# Altium schematic symbol library Mosfet.SchLib: 175 symbols (part 2 of 4)
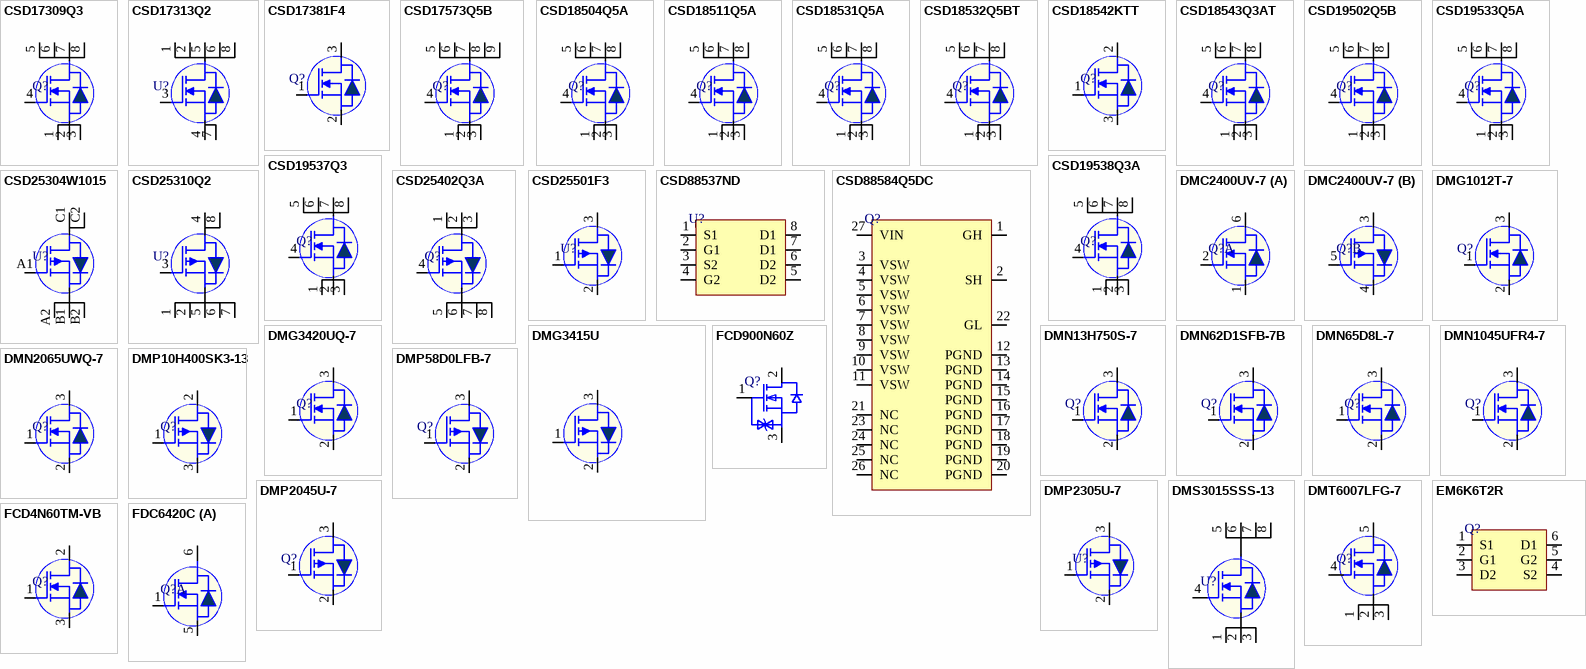
[diagram p5: symbols CSD17309Q3 to FDC6420C]

## CSD19533Q5A
designator Q?
MOSFET N-CH 100V 100A 8VSON; Manufacturer: Texas Instruments; Manufacturer Part Number: CSD19533Q5A; Item Type: MOSFETs; Rds On Max: 9.4mR; Input Capacitance: 2.67nF; Rise Time: 6ns; Max Power Dissipation: 3.2W; Threshold Voltage: 2.8V; Number of Elements: 1; Turn-Off Delay Time: 16ns; Fall Time: 5ns; Gate to Source Voltage (Vgs): 20V; Element Configuration: Single; Drain to Source Resistance: 8.7mR; Polarity: N-CHANNEL; Supplier: Mouser; LCSC Part Number: C110197; RoHS: Yes; Stock: 14779; Pricing: 1=1.43, 10=1.17, 50=1.17, 100=0.907, 1000=0.626, 10000=0.535 (USD); Mounting Technology: Surface Mount; Case/Package: SON; Pins: 8; Contact Plating: Tin; Min Operating Temperature: -55°C; Max Operating Temperature: 150°C; Package Quantity: 2500; Packaging: Tape and Reel; Drain to Source Voltage (Vdss): 100V; Continuous Drain Current (ID): 100A; Power Dissipation: 3.2W; Turn-On Delay Time: 6ns; Number of Channels: 1; Series: NexFET™; Drain to Source Breakdown Voltage: 100V; Lead Free: Contains Lead; Reach SVHC Compliant: No; RoHS Compliant: Yes; ComponentLink1URL: https://datasheet.ciiva.com/29752/csd19533q5a-29752194.pdf?src-supplier=Digikey; ComponentLink1Description: https://datasheet.ciiva.com/29752/csd19533q5a-29752194.pdf?src-supplier=Digikey; ComponentLink2URL: https://datasheet.ciiva.com/46430/1824682-46430379.pdf?src-supplier=Element14; ComponentLink2Description: https://datasheet.ciiva.com/46430/1824682-46430379.pdf?src-supplier=Element14; ComponentLink3URL: https://datasheet.ciiva.com/29752/csd19533q5a-29752206.pdf?src-supplier=Digikey; ComponentLink3Description: https://datasheet.ciiva.com/29752/csd19533q5a-29752206.pdf?src-supplier=Digikey; ComponentLink4URL: https://datasheet.ciiva.com/30021/csd19533q5a-30021948.pdf?src-supplier=Avnet; ComponentLink4Description: https://datasheet.ciiva.com/30021/csd19533q5a-30021948.pdf?src-supplier=Avnet
footprint 8-VSONP (5x6)
pins: 1 S, 2 S, 3 S, 4 G, 5 D, 6 D, 7 D, 8 D

## CSD19537Q3
designator Q?
MOSFET N-CH 100V 9.7A/50A 8VSON; Manufacturer: Texas Instruments; Manufacturer Part Number: CSD19537Q3; Item Type: MOSFETs; Supplier: Mouser; LCSC Part Number: C478469; RoHS: Yes; Stock: 5910; Pricing: 1=1.54, 10=1.02, 50=1.02, 100=0.694, 1000=0.514, 10000=0.439 (USD); ComponentLink1URL: http://www.ti.com/lit/gpn/csd19537q3?src-supplier=Mouser; ComponentLink1Description: http://www.ti.com/lit/gpn/csd19537q3?src-supplier=Mouser; ComponentLink2URL: http://www.ti.com/general/docs/lit/getliterature.tsp?genericPartNumber=CSD19537Q3&&fileType=pdf&src-supplier=Avnet; ComponentLink2Description: http://www.ti.com/general/docs/lit/getliterature.tsp?genericPartNumber=CSD19537Q3&&fileType=pdf&src-supplier=Avnet; ComponentLink3URL: http://www.ti.com/lit/ds/symlink/csd19537q3.pdf?src-supplier=Digikey; ComponentLink3Description: http://www.ti.com/lit/ds/symlink/csd19537q3.pdf?src-supplier=Digikey; ComponentLink4URL: http://www.ti.com/general/docs/suppproductinfo.tsp?distId=10&amp;gotoUrl=http%3A%2F%2Fwww.ti.com%2Flit%2Fgpn%2Fcsd19537q3&src-supplier=Digikey; ComponentLink4Description: http://www.ti.com/general/docs/suppproductinfo.tsp?distId=10&amp;gotoUrl=http%3A%2F%2Fwww.ti.com%2Flit%2Fgpn%2Fcsd19537q3&src-supplier=Digikey
footprint 8-VSON-CLIP (3.3x3.3)
pins: 1 S, 2 S, 3 S, 4 G, 5 D, 6 D, 7 D, 8 D

## CSD19538Q3A
designator Q?
MOSFET N-CH 100V 15A 8VSON; Manufacturer: Texas Instruments; Manufacturer Part Number: CSD19538Q3A; Item Type: IC; Drain to Source Resistance: 49mR; Gate to Source Voltage (Vgs): 20V; Number of Channels: 1NUMBER; Power Dissipation: 2.8W; Turn-Off Delay Time: 7ns; Turn-On Delay Time: 5ns; Supplier: Mouser; LCSC Part Number: C478471; RoHS: Yes; Stock: 14931; Pricing: 1=0.57, 10=0.496, 50=0.496, 100=0.343, 1000=0.244, 10000=0.19 (USD); Drain to Source Breakdown Voltage: 100V; Length: 3.3mm; Width: 3.3mm; Height: 900um; Thickness: 800um; Lead Free: 5697LeadFree; ComponentLink1URL: http://www.ti.com/lit/ds/symlink/csd19538q3a.pdf?src-supplier=Digikey; ComponentLink1Description: http://www.ti.com/lit/ds/symlink/csd19538q3a.pdf?src-supplier=Digikey
footprint VSONP-8(3.1x3.1)
pins: 1 S, 2 S, 3 S, 4 G, 5 D, 6 D, 7 D, 8 D

## CSD25304W1015
designator U?
MOSFET P-CH 20V 3A 6DSBGA; Manufacturer: Texas Instruments; Manufacturer Part Number: CSD25304W1015; Item Type: IC; Supplier: Digi-Key; Supplier Part Number: 296-40005-1-ND; RoHS: Yes; Category: Integrated Circuits (ICs); Stock: 3000; Pricing: 1=0.51, 10=0.436, 100=0.3252, 500=0.25552, 1000=0.19746 (USD); ComponentLink1URL: http://www.ti.com/general/docs/suppproductinfo.tsp?distId=10&amp;gotoUrl=http%3A%2F%2Fwww.ti.com%2Flit%2Fgpn%2Fcsd25304w1015&src-supplier=Digi-Key; ComponentLink1Description: http://www.ti.com/general/docs/suppproductinfo.tsp?distId=10&amp;gotoUrl=http%3A%2F%2Fwww.ti.com%2Flit%2Fgpn%2Fcsd25304w1015&src-supplier=Digi-Key; ComponentLink2URL: http://www.ti.com/lit/ds/symlink/csd25304w1015.pdf?src-supplier=Digi-Key; ComponentLink2Description: http://www.ti.com/lit/ds/symlink/csd25304w1015.pdf?src-supplier=Digi-Key; ComponentLink3URL: http://www.ti.com/general/docs/lit/getliterature.tsp?genericPartNumber=CSD25304W1015&&fileType=pdf&src-supplier=Avnet; ComponentLink3Description: http://www.ti.com/general/docs/lit/getliterature.tsp?genericPartNumber=CSD25304W1015&&fileType=pdf&src-supplier=Avnet; ComponentLink4URL: http://www.ti.com/lit/gpn/csd25304w1015?src-supplier=Mouser; ComponentLink4Description: http://www.ti.com/lit/gpn/csd25304w1015?src-supplier=Mouser; LCSC Part Number: C2860532
footprint 6-DSBGA (1x1.5)
pins: A1 G, A2 S, B1 S, B2 S, C1 D, C2 D

## CSD25310Q2
designator U?
MOSFET P-CH 20V 48A 6SON; Manufacturer: Texas Instruments; Manufacturer Part Number: CSD25310Q2; Supplier: Mouser; Supplier Part Number: 595-CSD25310Q2; RoHS: Yes; Category: Integrated Circuits (ICs); Stock: 10899; Pricing: 1=0.51, 10=0.438, 50=0.438, 100=0.327, 1000=0.198, 10000=0.136 (USD); ComponentLink1URL: https://datasheet.ciiva.com/29747/csd25310q2-29747573.pdf?src-supplier=Digi-Key; ComponentLink1Description: https://datasheet.ciiva.com/29747/csd25310q2-29747573.pdf?src-supplier=Digi-Key; LCSC Part Number: C468254; Item Type: Mosfet
footprint CSD25310Q2
pins: 1 S, 2 S, 3 G, 4 D, 5 S, 6 S, 7 S, 8 D

## CSD25402Q3A
designator Q?
MOSFET P-CH 20V 76A 8VSON; Manufacturer: Texas Instruments; Manufacturer Part Number: CSD25402Q3A; Item Type: MOSFETs; Power Dissipation: 2.8W; Supplier: Mouser; Supplier Part Number: 595-CSD25402Q3A; RoHS: Yes; Stock: 40126; Pricing: 1=0.81, 10=0.722, 50=0.722, 100=0.493, 1000=0.35, 10000=0.312 (USD); Thickness: 800um; ComponentLink1URL: https://datasheet.ciiva.com/30021/csd25402q3a-30021955.pdf?src-supplier=Avnet; ComponentLink1Description: https://datasheet.ciiva.com/30021/csd25402q3a-30021955.pdf?src-supplier=Avnet; LCSC Part Number: C111356
footprint 8-VSONP (3x3.3)
pins: 1 D, 2 D, 3 D, 4 G, 5 S, 6 S, 7 S, 8 S

## CSD25501F3
designator U?
MOSFET P-CH 20V 3.6A 3LGA; Manufacturer: Texas Instruments; Manufacturer Part Number: CSD25501F3; Element Configuration: Single; Rds On Max: 76mR; Input Capacitance: 385pF; Max Power Dissipation: 500mW; Item Type: IC; Supplier: Mouser; Supplier Part Number: 595-CSD25501F3; RoHS: Yes; Category: Integrated Circuits (ICs); Stock: 42227; Pricing: 1=0.45, 10=0.34, 50=0.34, 100=0.212, 1000=0.112, 10000=0.086 (USD); Mounting Technology: Surface Mount; Case/Package: LGA; Pins: 3; Min Operating Temperature: -55°C; Max Operating Temperature: 150°C; Packaging: Cut Tape; Drain to Source Voltage (Vdss): 20V; Continuous Drain Current (ID): 3.6A; Series: FemtoFET™; RoHS Compliant: Yes; ComponentLink1URL: http://www.ti.com/lit/ds/symlink/csd25501f3.pdf?src-supplier=Digi-Key; ComponentLink1Description: http://www.ti.com/lit/ds/symlink/csd25501f3.pdf?src-supplier=Digi-Key; ComponentLink2URL: http://www.ti.com/general/docs/suppproductinfo.tsp?distId=10&amp;gotoUrl=http%3A%2F%2Fwww.ti.com%2Flit%2Fgpn%2Fcsd25501f3&src-supplier=Digi-Key; ComponentLink2Description: http://www.ti.com/general/docs/suppproductinfo.tsp?distId=10&amp;gotoUrl=http%3A%2F%2Fwww.ti.com%2Flit%2Fgpn%2Fcsd25501f3&src-supplier=Digi-Key; LCSC Part Number: C2872196
footprint PicoStar-3
pins: 1 G, 2 S, 3 D

## CSD88537ND
designator U?
MOSFET 2N-CH 60V 15A 8SOIC; Manufacturer: Texas Instruments; Manufacturer Part Number: CSD88537ND; Item Type: IC; Supplier: Mouser; LCSC Part Number: C117439; RoHS: Yes; Stock: 24825; Pricing: 1=1.26, 10=1.03, 50=1.03, 100=0.8, 1000=0.552, 10000=0.494 (USD); ComponentLink1URL: https://datasheet.ciiva.com/29589/csd88537nd-29589985.pdf?src-supplier=Digikey; ComponentLink1Description: https://datasheet.ciiva.com/29589/csd88537nd-29589985.pdf?src-supplier=Digikey; ComponentLink2URL: https://datasheet.ciiva.com/46430/1857624-46430364.pdf?src-supplier=Element14; ComponentLink2Description: https://datasheet.ciiva.com/46430/1857624-46430364.pdf?src-supplier=Element14
footprint SOIC-8
pins: 1 S1, 2 G1, 3 S2, 4 G2, 5 D2, 6 D2, 7 D1, 8 D1

## CSD88584Q5DC
designator Q?
MOSFET 2N-CH 40V 22VSON-CLIP; Manufacturer: Texas Instruments; Manufacturer Part Number: CSD88584Q5DC; Supplier: Mouser; LCSC Part Number: C2683056; RoHS: Yes; Item Type: Mosfet; Stock: 1343; Pricing: 1=3.63, 10=3.04, 50=3.02, 100=2.46, 1000=1.88, 10000=1.76 (USD); ComponentLink1URL: http://www.ti.com/general/docs/suppproductinfo.tsp?distId=10&amp;gotoUrl=http%3A%2F%2Fwww.ti.com%2Flit%2Fgpn%2Fcsd88584q5dc&src-supplier=Digikey; ComponentLink1Description: http://www.ti.com/general/docs/suppproductinfo.tsp?distId=10&amp;gotoUrl=http%3A%2F%2Fwww.ti.com%2Flit%2Fgpn%2Fcsd88584q5dc&src-supplier=Digikey; ComponentLink2URL: http://www.ti.com/lit/ds/symlink/csd88584q5dc.pdf?src-supplier=Digikey; ComponentLink2Description: http://www.ti.com/lit/ds/symlink/csd88584q5dc.pdf?src-supplier=Digikey
footprint 22-VSON-CLIP (5x6)
pins: 1 GH, 2 SH, 3 VSW, 4 VSW, 5 VSW, 6 VSW, 7 VSW, 8 VSW, 9 VSW, 10 VSW, 11 VSW, 12 PGND, 13 PGND, 14 PGND, 15 PGND, 16 PGND, 17 PGND, 18 PGND, 19 PGND, 20 PGND, 21 NC, 22 GL, 23 NC, 24 NC, 25 NC, 26 NC, 27 VIN

## DMC2400UV-7
designator Q?
MOSFET N/P-CH 20V SOT563; Manufacturer: Diodes; Manufacturer Part Number: DMC2400UV-7; Item Type: MOSFETs; Max Power Dissipation: 450mW; Rds On Max: 480mR; Input Capacitance: 37.1pF; Continuous Drain Current (ID): 1.03A; Turn-Off Delay Time: 13.74ns; Turn-On Delay Time: 4.06ns; FET Type: N and P-Channel; Drain-source On Resistance-Max: 970mR; Supplier: Future Electronics; LCSC Part Number: C177025; RoHS: Yes; Stock: 207000; Pricing: 3000=0.0517, 9000=0.0497, 12000=0.0492, 30000=0.0476, 45000=0.046 (USD); Mounting Technology: Surface Mount; Case/Package: SOT-563; Pins: 6; Min Operating Temperature: -55°C; Max Operating Temperature: 150°C; Packaging: Tape and Reel; Drain to Source Voltage (Vdss): 20V; Series: -; Length: 1.7mm; Width: 1.25mm; Height: 0.6mm; Radiation Hardening: No; RoHS Compliant: Yes; Lead Free: Lead Free; Reach SVHC Compliant: Yes; ComponentLink1URL: https://datasheet.ciiva.com/11176/dmc2400uv-11176335.pdf?src-supplier=Avnet; ComponentLink1Description: https://datasheet.ciiva.com/11176/dmc2400uv-11176335.pdf?src-supplier=Avnet
footprint SOT-563
part A pins: 1 S1, 2 G1, 6 D1
part B pins: 3 D2, 4 S2, 5 G2

## DMG1012T-7
designator Q?
MOSFET N-CH 20V 630MA SOT523; Manufacturer: Diodes; Manufacturer Part Number: DMG1012T-7; Rds On Max: 400mR; Input Capacitance: 60.67pF; Max Power Dissipation: 280mW; Rise Time: 7.4ns; Fall Time: 12.3ns; Turn-On Delay Time: 5.1ns; Turn-Off Delay Time: 26.7ns; Gate to Source Voltage (Vgs): 6V; Number of Elements: 1; Drain to Source Resistance: 300mR; Element Configuration: Single; Polarity: N-CHANNEL; Threshold Voltage: 1V; FET Type: 1 N-Channel; Supplier 1: Digi-Key; Stock 1: 0; Pricing 1: 1=0.32, 10=0.26, 25=0.2176, 100=0.1379, 500=0.09076, 1000=0.06171 (USD); Mount: Surface Mount; Case/Package: SOT-523; Number of Pins: 3; Weight: 7.1E-05oz; Contact Plating: Tin,Matte; Min Operating Temperature: -55°C; Max Operating Temperature: 150°C; Continuous Drain Current (ID): 630mA; Packaging: Tape and Reel; Drain to Source Voltage (Vdss): 20V; Package Quantity: 3000; Drain to Source Breakdown Voltage: 20V; Power Dissipation: 280mW; Series: -; Number of Channels: 1; On-State Resistance: 400MR; Drain-source On Resistance-Max: 400MR; Length: 1.7mm; Width: 0.85mm; Height: 0.8mm; Radiation Hardening: No; RoHS Compliant: Yes; REACH SVHC: No SVHC; Lead Free: Lead Free; ComponentLink1URL: http://www.mouser.com/ds/2/115/ds31783-44973.pdf?src-supplier=Mouser; ComponentLink1Description: http://www.mouser.com/ds/2/115/ds31783-44973.pdf?src-supplier=Mouser; ComponentLink2URL: http://www.diodes.com//datasheets/ds31783.pdf?src-supplier=Avnet; ComponentLink2Description: http://www.diodes.com//datasheets/ds31783.pdf?src-supplier=Avnet; ComponentLink3URL: http://www.diodes.com//datasheets/ds31783.pdf?src-supplier=Avnet+Europe; ComponentLink3Description: http://www.diodes.com//datasheets/ds31783.pdf?src-supplier=Avnet+Europe; ComponentLink4URL: https://www.diodes.com/assets/Datasheets/ds31783.pdf?src-supplier=Digi-Key; ComponentLink4Description: https://www.diodes.com/assets/Datasheets/ds31783.pdf?src-supplier=Digi-Key; Supplier Part Number 1: DMG1012T-7DICT-ND; LCSC Part Number: C20512
footprint SOT-523_
pins: 1 G, 2 S, 3 D

## DMG3415U
designator Q?
P-Channel MOSFETs ROHS; Manufacturer: TECH PUBLIC; Manufacturer Part Number: DMG3415U; Item Type: MOSFET; Package: SOT-23; LCSC Part Number: C7202986; ComponentLink1Description: LCSC; ComponentLink1URL: https://www.lcsc.com/product-detail/MOSFETs_TECH-PUBLIC-DMG3415U_C7202986.html
footprint SOT-23 (TRANS NPN 40V 0.6A SOT23)
pins: 1 G, 2 S, 3 D

## DMG3420UQ-7
designator Q?
MOSFET BVDSS: 8V~24V SOT23 T&R 3; Manufacturer: Diodes; Manufacturer Part Number: DMG3420UQ-7; Item Type: MOSFETs; Supplier: Digikey; LCSC Part Number: C5157847; RoHS: Yes; Stock: 5879; Pricing: 1=0.45, 10=0.276, 100=0.1748, 500=0.1308, 1000=0.11658 (USD); RoHS Compliant: Yes
footprint SOT-23 (TRANS NPN 40V 0.6A SOT23)
pins: 1 G, 2 S, 3 D

## DMN13H750S-7
designator Q?
MOSFET N-CH 130V 1A SOT23; Manufacturer: Diodes Incorporated; Manufacturer Part Number: DMN13H750S-7; Package: SOT-23-3L; LCSC Part Number: C156273; Item Type: Mosfet; ComponentLink1URL: https://www.lcsc.com/product-detail/MOSFETs_Diodes-Incorporated-DMN13H750S-7_C156273.html; ComponentLink1Description: LCSC
footprint SOT-23 (TRANS NPN 40V 0.6A SOT23)
pins: 1 G, 2 S, 3 D

## DMN62D1SFB-7B
designator Q?
MOSFET N-CH 60V 410MA 3DFN; Manufacturer: Diodes Zetex; Manufacturer Part Number: DMN62D1SFB-7B; Rds On Max: 1.4R; Input Capacitance: 80pF; Rise Time: 4.93ns; Max Power Dissipation: 470mW; Number of Elements: 1; Turn-On Delay Time: 3.89ns; Turn-Off Delay Time: 18.8ns; Fall Time: 11.96ns; Gate to Source Voltage (Vgs): 20V; FET Type: 1 N-Channel; Polarity: N-CHANNEL; Supplier 1: Digi-Key; RoHS: Yes; Category: MOSFETs; Stock 1: 143828; Pricing 1: 1=0.50000, 10=0.37900, 100=0.23620, 500=0.16160, 1000=0.12430, 2000=0.11187, 5000=0.10566 (USD); Mount: Surface Mount; Case/Package: DFN; Number of Pins: 3; Min Operating Temperature: -55°C; Max Operating Temperature: 150°C; Packaging: Tape and Reel; Package Quantity: 10000; Drain to Source Voltage (Vdss): 60V; Continuous Drain Current (ID): 410mA; Drain to Source Resistance: 1.4R; Power Dissipation: 470mW; Number of Channels: 1; Series: DMN62; Radiation Hardening: No; Reach SVHC Compliant: Yes; RoHS Compliant: Yes; ComponentLink1URL: https://datasheet.ciiva.com/18648/dmn62d1sfb-18648295.pdf?src-supplier=Digi-Key; ComponentLink1Description: https://datasheet.ciiva.com/18648/dmn62d1sfb-18648295.pdf?src-supplier=Digi-Key; ComponentLink2URL: https://datasheet.ciiva.com/11176/dmn62d1sfb-11176555.pdf?src-supplier=Avnet; ComponentLink2Description: https://datasheet.ciiva.com/11176/dmn62d1sfb-11176555.pdf?src-supplier=Avnet; Supplier Part Number 1: DMN62D1SFB-7BDICT-ND; LCSC Part Number: C531164; Item Type: Mosfet
footprint DFN1006-3
pins: 1 G, 2 S, 3 D

## DMN65D8L-7
designator Q?
MOSFET N-CH 60V 310MA SOT23; Manufacturer: Diodes; Manufacturer Part Number: DMN65D8L-7; Item Type: MOSFETs; Supplier: Rs; LCSC Part Number: C155341; RoHS: Yes; Stock: 275000; ComponentLink1URL: https://datasheet.ciiva.com/13058/dmn65d8l-219098-13058455.pdf?src-supplier=Mouser; ComponentLink1Description: https://datasheet.ciiva.com/13058/dmn65d8l-219098-13058455.pdf?src-supplier=Mouser
footprint SOT-23 (TRANS NPN 40V 0.6A SOT23)
pins: 1 G, 2 S, 3 D

## DMN1045UFR4-7
designator Q?
MOSFET N-CH 12V 3.2A 3DFN; Manufacturer: Diodes; Manufacturer Part Number: DMN1045UFR4-7; Rds On Max: 45mR; Input Capacitance: 375pF; Max Power Dissipation: 500mW; Supplier 1: Digi-Key; RoHS: Yes; Category: MOSFETs; Pricing 1: 1=0.50000, 10=0.37400, 100=0.23280, 500=0.15930, 1000=0.12254 (USD); Mount: Surface Mount; Number of Pins: 3; Min Operating Temperature: -55°C; Max Operating Temperature: 150°C; Packaging: Tape and Reel; Drain to Source Voltage (Vdss): 12V; Continuous Drain Current (ID): 3.2A; RoHS Compliant: Yes; ComponentLink1URL: http://www.mouser.com/ds/2/115/DMN1045UFR4-526244.pdf?src-supplier=Mouser; ComponentLink1Description: http://www.mouser.com/ds/2/115/DMN1045UFR4-526244.pdf?src-supplier=Mouser; ComponentLink2URL: https://www.diodes.com/assets/Datasheets/DMN1045UFR4.pdf?src-supplier=Digi-Key; ComponentLink2Description: https://www.diodes.com/assets/Datasheets/DMN1045UFR4.pdf?src-supplier=Digi-Key; Supplier Part Number 1: DMN1045UFR4-7DIDKR-ND; LCSC Part Number: C460988
footprint X2-DFN1010-3
pins: 1 G, 2 S, 3 D

## DMN2065UWQ-7
designator Q?
MOSFET N-CH 20V 3.1A SOT323; Manufacturer: Diodes; Manufacturer Part Number: DMN2065UWQ-7; Rds On Max: 56mR; Input Capacitance: 400pF; Max Power Dissipation: 700mW; Supplier: Digi-Key; Supplier Part Number: DMN2065UWQ-7DICT-ND; RoHS: Yes; Category: MOSFETs; Stock: 10142; Pricing: 1=0.43, 10=0.32, 100=0.1995, 500=0.1365, 1000=0.105 (USD); Mounting Technology: Surface Mount; Case/Package: SOT-323; Min Operating Temperature: -55°C; Max Operating Temperature: 150°C; Packaging: Cut Tape; Drain to Source Voltage (Vdss): 20V; Continuous Drain Current (ID): 3.1A; Series: -; RoHS Compliant: Yes; ComponentLink1URL: https://www.diodes.com/assets/Datasheets/DMN2065UWQ.pdf?src-supplier=Digi-Key; ComponentLink1Description: https://www.diodes.com/assets/Datasheets/DMN2065UWQ.pdf?src-supplier=Digi-Key; LCSC Part Number: C1323283; Item Type: MOSFET
footprint SOT-323
pins: 1 G, 2 S, 3 D

## DMP10H400SK3-13
designator Q?
MOSFET P-CH 100V 9A TO252-3; Manufacturer: Diodes; Manufacturer Part Number: DMP10H400SK3-13; Item Type: MOSFETs; Supplier: Future Electronics; Supplier Part Number: 1049276; RoHS: Yes; Stock: 230000; Pricing: 2500=0.186, 5000=0.182, 10000=0.179, 12500=0.177, 37500=0.171 (USD); ComponentLink1URL: https://datasheet.ciiva.com/6374/dmp10h400sk3-6374772.pdf?src-supplier=Digikey; ComponentLink1Description: https://datasheet.ciiva.com/6374/dmp10h400sk3-6374772.pdf?src-supplier=Digikey; ComponentLink2URL: https://datasheet.ciiva.com/6374/dmp10h400sk3-6374774.pdf?src-supplier=Digikey; ComponentLink2Description: https://datasheet.ciiva.com/6374/dmp10h400sk3-6374774.pdf?src-supplier=Digikey; ComponentLink3URL: https://datasheet.ciiva.com/6374/dmp10h400sk3-6374775.pdf?src-supplier=Digikey; ComponentLink3Description: https://datasheet.ciiva.com/6374/dmp10h400sk3-6374775.pdf?src-supplier=Digikey
footprint TO-252-2L
pins: 1 G, 2 D, 3 S

## DMP58D0LFB-7
designator Q?
MOSFET P-CH 50V 180MA 3DFN; Manufacturer: Diodes Zetex; Manufacturer Part Number: DMP58D0LFB-7; Rds On Max: 8R; Input Capacitance: 27pF; Continuous Drain Current (ID): 310mA; Max Power Dissipation: 470mW; Rise Time: 84.1ns; Turn-On Delay Time: 30.7ns; Turn-Off Delay Time: 201.8ns; Fall Time: 32.2ns; Number of Elements: 1; Power Dissipation: 1.22W; Gate to Source Voltage (Vgs): 20V; Drain to Source Resistance: 18mR; Polarity: P-CHANNEL; Drain to Source Breakdown Voltage: -50V; Supplier 1: Digi-Key; RoHS: Yes; Category: MOSFETs; Stock 1: 14645; Pricing 1: 1=0.41000, 10=0.30700, 100=0.19150, 500=0.13104, 1000=0.10080 (USD); Mount: Surface Mount; Case/Package: DFN; Number of Pins: 3; Min Operating Temperature: -55°C; Max Operating Temperature: 150°C; Packaging: Tape and Reel; Package Quantity: 3000; Drain to Source Voltage (Vdss): 50V; Series: -; Number of Channels: 1; Radiation Hardening: No; Reach SVHC Compliant: Yes; RoHS Compliant: Yes; ComponentLink1URL: https://datasheet.ciiva.com/11175/dmp58d0lfb-11175008.pdf?src-supplier=Avnet; ComponentLink1Description: https://datasheet.ciiva.com/11175/dmp58d0lfb-11175008.pdf?src-supplier=Avnet; ComponentLink2URL: https://datasheet.ciiva.com/13055/dmp58d0lfb-219475-13055612.pdf?src-supplier=Mouser; ComponentLink2Description: https://datasheet.ciiva.com/13055/dmp58d0lfb-219475-13055612.pdf?src-supplier=Mouser; ComponentLink3URL: https://datasheet.ciiva.com/18648/dmp58d0lfb-18648299.pdf?src-supplier=Digi-Key; ComponentLink3Description: https://datasheet.ciiva.com/18648/dmp58d0lfb-18648299.pdf?src-supplier=Digi-Key; Supplier Part Number 1: DMP58D0LFB-7DICT-ND; LCSC Part Number: C150737; Item Type: Mosfet
footprint DFN1006-3
pins: 1 G, 2 S, 3 D

## DMP2045U-7
designator Q?
MOSFET P-CHAN 24V SOT23; Manufacturer: Diodes; Manufacturer Part Number: DMP2045U-7; Drain to Source Voltage (Vdss): 20V; Continuous Drain Current (ID): 4.3A; Rds On Max: 45mR; Input Capacitance: 634pF; Max Power Dissipation: 800mW; Supplier 1: Digi-Key; Stock 1: 22481; Pricing 1: 1=0.45, 10=0.333, 100=0.1581, 500=0.12896, 1000=0.09568 (USD); Mount: Surface Mount; Case/Package: SOT-23; Min Operating Temperature: -55°C; Max Operating Temperature: 150°C; Packaging: Tape and Reel; ComponentLink1URL: https://www.diodes.com/assets/Datasheets/DMP2045U.pdf?src-supplier=Digi-Key; ComponentLink1Description: https://www.diodes.com/assets/Datasheets/DMP2045U.pdf?src-supplier=Digi-Key; Supplier Part Number 1: DMP2045U-7DICT-ND; LCSC Part Number: C459541
footprint SOT-23 (TRANS NPN 40V 0.6A SOT23)
pins: 1 G, 2 S, 3 D

## DMP2305U-7
designator U?
MOSFET P-CH 20V 4.2A SOT23-3; Manufacturer: Diodes Zetex; Manufacturer Part Number: DMP2305U-7; Item Type: MOSFETs; Supplier: Future Electronics; LCSC Part Number: C85097; RoHS: Yes; Stock: 207000; Pricing: 3000=0.0412, 9000=0.0402, 15000=0.0398, 45000=0.0388, 75000=0.038 (USD); ComponentLink1URL: https://datasheet.ciiva.com/13059/ds31737-52560-13059868.pdf?src-supplier=Mouser; ComponentLink1Description: https://datasheet.ciiva.com/13059/ds31737-52560-13059868.pdf?src-supplier=Mouser; ComponentLink2URL: https://datasheet.ciiva.com/11176/ds31737-11176455.pdf?src-supplier=Avnet; ComponentLink2Description: https://datasheet.ciiva.com/11176/ds31737-11176455.pdf?src-supplier=Avnet
footprint SOT-23 (TRANS NPN 40V 0.6A SOT23)
pins: 1 G, 2 S, 3 D

## DMS3015SSS-13
designator U?
MOSFET N-CH 30V 11A 8SO; Manufacturer: Diodes; Manufacturer Part Number: DMS3015SSS-13; Item Type: IC; Supplier: Digikey; Supplier Part Number: DMS3015SSS-13DICT-ND; RoHS: Yes; Stock: 41483; Pricing: 1=0.43, 10=0.366, 100=0.2543, 500=0.19854, 1000=0.16138 (USD); ComponentLink1URL: https://datasheet.ciiva.com/8115/ds32096-8115505.pdf?src-supplier=Avnet; ComponentLink1Description: https://datasheet.ciiva.com/8115/ds32096-8115505.pdf?src-supplier=Avnet; ComponentLink2URL: https://datasheet.ciiva.com/4443/ds32096-88633-4443151.pdf?src-supplier=Mouser; ComponentLink2Description: https://datasheet.ciiva.com/4443/ds32096-88633-4443151.pdf?src-supplier=Mouser; ComponentLink3URL: https://datasheet.ciiva.com/6367/ds32096-6367776.pdf?src-supplier=Digikey; ComponentLink3Description: https://datasheet.ciiva.com/6367/ds32096-6367776.pdf?src-supplier=Digikey; ComponentLink4URL: https://datasheet.ciiva.com/6367/ds32096-6367773.pdf?src-supplier=Digikey; ComponentLink4Description: https://datasheet.ciiva.com/6367/ds32096-6367773.pdf?src-supplier=Digikey; ComponentLink5URL: https://datasheet.ciiva.com/6367/ds32096-6367774.pdf?src-supplier=Digikey; ComponentLink5Description: https://datasheet.ciiva.com/6367/ds32096-6367774.pdf?src-supplier=Digikey
footprint SOP-8
pins: 1 S, 2 S, 3 S, 4 G, 5 D, 6 D, 7 D, 8 D

## DMT6007LFG-7
designator Q?
MOSFET N-CH 60V 15A PWRDI3333; Manufacturer: Diodes; Manufacturer Part Number: DMT6007LFG-7; Item Type: MOSFETs; Continuous Drain Current (ID): 80A; Rds On Max: 6mR; Input Capacitance: 2.09nF; Max Power Dissipation: 2.2W; Supplier: Digikey; LCSC Part Number: C2802568; RoHS: Yes; Stock: 22065; Pricing: 1=1.33, 10=0.897, 100=0.628, 500=0.50734, 1000=0.46783 (USD); Mounting Technology: Surface Mount; Pins: 8; Min Operating Temperature: -55°C; Max Operating Temperature: 150°C; Packaging: Cut Tape; Drain to Source Voltage (Vdss): 60V; Series: -; RoHS Compliant: Yes; ComponentLink1URL: http://www.mouser.com/ds/2/115/DMT6007LFG-792694.pdf?src-supplier=Mouser; ComponentLink1Description: http://www.mouser.com/ds/2/115/DMT6007LFG-792694.pdf?src-supplier=Mouser; ComponentLink2URL: https://www.diodes.com/assets/Datasheets/DMT6007LFG.pdf?src-supplier=Digikey; ComponentLink2Description: https://www.diodes.com/assets/Datasheets/DMT6007LFG.pdf?src-supplier=Digikey
footprint PowerDI-3333-8
pins: 1 S, 2 S, 3 S, 4 G, 5 D

## EM6K6T2R
designator Q?
MOSFET 2N-CH 20V 0.3A EMT6; Manufacturer: ROHM; Manufacturer Part Number: EM6K6T2R; Description: Transistor MOSFET Array Dual N-CH 20V 300mA 6-Pin SOT-563 Emboss T/R; Item Type: MOSFETs; Continuous Drain Current (ID): 300mA; Drain to Source Resistance: 1.4Ω; Element Configuration: Dual; Fall Time: 10ns; Gate to Source Voltage (Vgs): 8V; Input Capacitance: 25pF; Max Power Dissipation: 150mW; Number of Elements: 2; Rds On Max: 1Ω; Turn-Off Delay Time: 15ns; Turn-On Delay Time: 5ns; Supplier: DigiKey; Supplier Part Number: EM6K6T2RCT-ND; RoHS: Compliant; Stock: 6135; Pricing: 1=0.62, 10=0.382, 100=0.2444, 500=0.18482, 1000=0.1576, 2000=0.14939 (USD); Drain to Source Breakdown Voltage: 20V; Drain to Source Voltage (Vdss): 20V; Lead Free: Lead Free; Lifecycle Status: Production; Max Operating Temperature: 150°C; Min Breakdown Voltage: 20V; Min Operating Temperature: -55°C; Mounting Technology: Surface Mount; Pins: 6; Number of Terminals: 6; Packaging: Tape and Reel; Power Dissipation: 150mW; Radiation Hardening: No; REACH SVHC: Yes; Rise Time: 10ns; ComponentLink1URL: https://datasheet.octopart.com:443/EM6K6T2R-Rohm-datasheet-142142716.pdf?src-supplier=IHS; ComponentLink1Description: https://datasheet.octopart.com:443/EM6K6T2R-Rohm-datasheet-142142716.pdf?src-supplier=IHS; ComponentLink2URL: https://datasheet.octopart.com:443/EM6K6T2R-Rohm-datasheet-73765466.pdf?src-supplier=Newark; ComponentLink2Description: https://datasheet.octopart.com:443/EM6K6T2R-Rohm-datasheet-73765466.pdf?src-supplier=Newark; ComponentLink3URL: https://datasheet.octopart.com:443/EM6K6T2R-Rohm-datasheet-8326879.pdf?src-supplier=_legacy+Avnet; ComponentLink3Description: https://datasheet.octopart.com:443/EM6K6T2R-Rohm-datasheet-8326879.pdf?src-supplier=_legacy+Avnet
footprint SOT-563
pins: 1 S1, 2 G1, 3 D2, 4 S2, 5 G2, 6 D1

## FCD4N60TM-VB
designator Q?
650V 5A 950mΩ@10V 1 N-Channel TO-252 MOSFETs ROHS; Manufacturer: VBsemi Elec; Manufacturer Part Number: FCD4N60TM-VB; Package: TO-252; LCSC Part Number: C20755211; Item Type: MOSFETs; ComponentLink1Description: LCSC; ComponentLink1URL: https://www.lcsc.com/product-detail/MOSFETs_VBsemi-Elec-FCD4N60TM-VB_C20755211.html
footprint TO-252-2L
pins: 1 G, 2 D, 3 S

## FCD900N60Z
designator Q?
MOSFET N-CH 600V 4.5A TO252; Manufacturer: ON Semiconductor / Fairchild; Manufacturer Part Number: FCD900N60Z; Item Type: MOSFETs; Supplier: Arrow Electronics; LCSC Part Number: C352877; RoHS: Yes; Stock: 2500; Pricing: 2500=1.0164, 5000=0.9652, 10000=0.9329, 20000=0.9155, 25000=0.8927, 50000=0.8623 (USD); ComponentLink1URL: https://datasheet.ciiva.com/29748/fcd900n60z-29748322.pdf?src-supplier=Digikey; ComponentLink1Description: https://datasheet.ciiva.com/29748/fcd900n60z-29748322.pdf?src-supplier=Digikey; ComponentLink2URL: https://datasheet.ciiva.com/13043/fcd900n60z-13043319.pdf?src-supplier=Mouser; ComponentLink2Description: https://datasheet.ciiva.com/13043/fcd900n60z-13043319.pdf?src-supplier=Mouser; ComponentLink3URL: https://datasheet.ciiva.com/29748/fcd900n60z-29748314.pdf?src-supplier=Digikey; ComponentLink3Description: https://datasheet.ciiva.com/29748/fcd900n60z-29748314.pdf?src-supplier=Digikey; ComponentLink4URL: https://datasheet.ciiva.com/29748/fcd900n60z-29748317.pdf?src-supplier=Digikey; ComponentLink4Description: https://datasheet.ciiva.com/29748/fcd900n60z-29748317.pdf?src-supplier=Digikey
footprint TO-252-2L
pins: 1 G, 2 D, 3 S

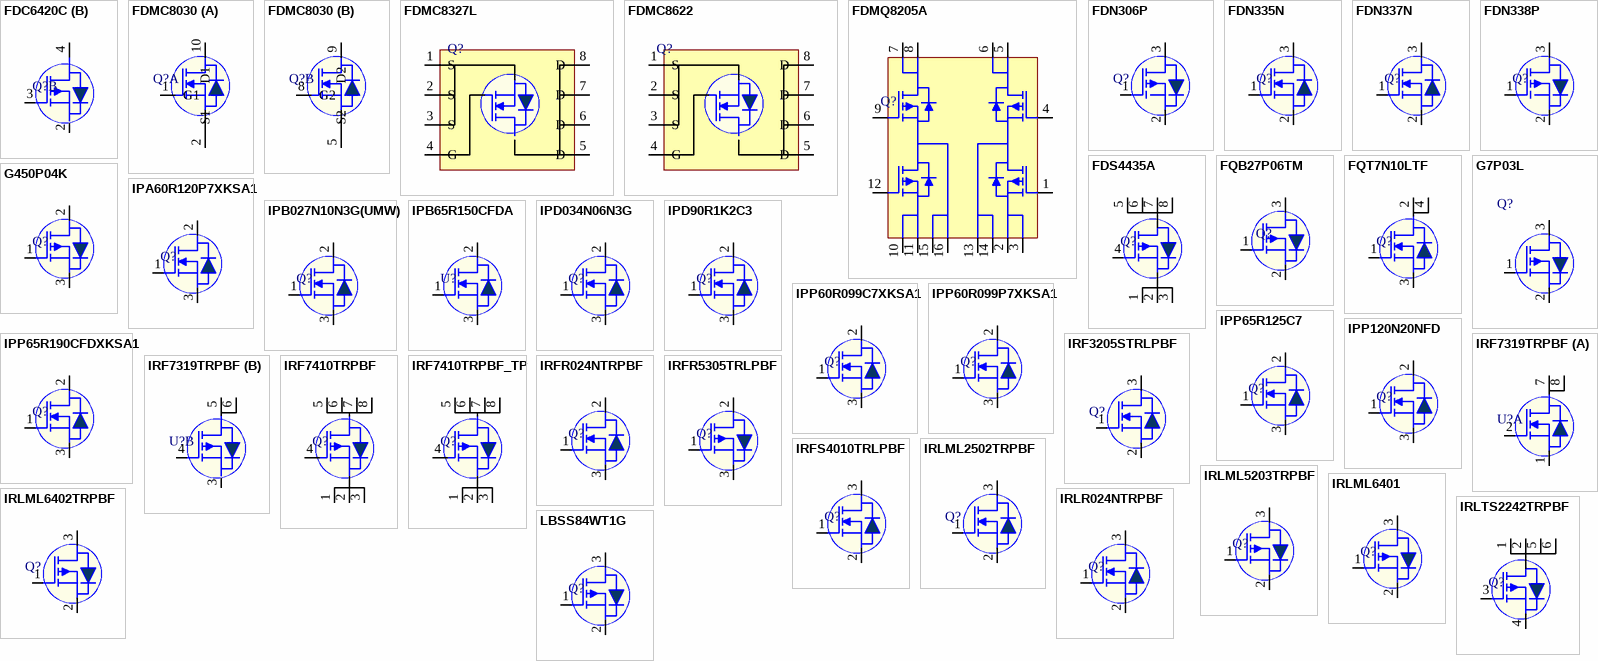
[diagram p2: symbols FDC6420C to LBSS84WT1G]

## FDC6420C
designator Q?
MOSFET N/P-CH 20V 3A/2.2A SSOT-6; Manufacturer: ON Semiconductor / Fairchild; Manufacturer Part Number: FDC6420C; Item Type: MOSFETs; Supplier: Future Electronics; LCSC Part Number: C154515; RoHS: Yes; Stock: 42000; Pricing: 3000=0.21, 6000=0.205, 9000=0.2, 12000=0.2, 15000=0.195 (USD); ComponentLink1URL: https://datasheet.ciiva.com/4440/fdc6420c-102817-4440882.pdf?src-supplier=Mouser; ComponentLink1Description: https://datasheet.ciiva.com/4440/fdc6420c-102817-4440882.pdf?src-supplier=Mouser; ComponentLink2URL: https://datasheet.ciiva.com/6039/265059-6039814.pdf?src-supplier=Farnell; ComponentLink2Description: https://datasheet.ciiva.com/6039/265059-6039814.pdf?src-supplier=Farnell; ComponentLink3URL: https://datasheet.ciiva.com/6386/fdc6420c-6386714.pdf?src-supplier=Digikey; ComponentLink3Description: https://datasheet.ciiva.com/6386/fdc6420c-6386714.pdf?src-supplier=Digikey; ComponentLink4URL: https://datasheet.ciiva.com/6386/fdc6420c-6386716.pdf?src-supplier=Digikey; ComponentLink4Description: https://datasheet.ciiva.com/6386/fdc6420c-6386716.pdf?src-supplier=Digikey; ComponentLink5URL: https://datasheet.ciiva.com/8115/fdc6420c-8115576.pdf?src-supplier=Avnet; ComponentLink5Description: https://datasheet.ciiva.com/8115/fdc6420c-8115576.pdf?src-supplier=Avnet; ComponentLink6URL: https://datasheet.ciiva.com/7967/265059-7967846.pdf?src-supplier=Element14; ComponentLink6Description: https://datasheet.ciiva.com/7967/265059-7967846.pdf?src-supplier=Element14; ComponentLink7URL: https://datasheet.ciiva.com/22681/265059-22681865.pdf?src-supplier=Element14; ComponentLink7Description: https://datasheet.ciiva.com/22681/265059-22681865.pdf?src-supplier=Element14; ComponentLink8URL: https://datasheet.ciiva.com/17288/fdc6420c-17288069.pdf?src-supplier=Future+Electronics; ComponentLink8Description: https://datasheet.ciiva.com/17288/fdc6420c-17288069.pdf?src-supplier=Future+Electronics
footprint SuperSOT-6
part A pins: 1 G1, 5 S1, 6 D1
part B pins: 2 S2, 3 G2, 4 D2

## FDMC8030
designator Q?
MOSFET 2N-CH 40V 12A 8POWER33; Manufacturer: ON Semiconductor / Fairchild; Manufacturer Part Number: FDMC8030; Rise Time: 3ns; Rds On Max: 10mR; Input Capacitance: 1.975nF; Power Dissipation: 800mW; Turn-On Delay Time: 7ns; Turn-Off Delay Time: 19ns; Element Configuration: Dual; Gate to Source Voltage (Vgs): 12V; FET Type: 2 N-Channel; Polarity: N-CHANNEL; Number of Elements: 1; Supplier 1: Future Electronics; RoHS: Yes; Category: Uncategorized; Pricing 1: 3000=0.59500, 6000=0.57500 (USD); Mount: Surface Mount; Number of Pins: 8; Weight: 0.196g; Min Operating Temperature: -55°C; Max Operating Temperature: 150°C; Packaging: Tape and Reel; Package Quantity: 3000; Continuous Drain Current (ID): 12A; Drain to Source Breakdown Voltage: 40V; Drain to Source Resistance: 10mR; Drain to Source Voltage (Vdss): 40V; Max Power Dissipation: 800mW; Fall Time: 3ns; Series: PowerTrench®; Length: 3mm; Width: 3mm; Height: 0.75mm; Radiation Hardening: No; RoHS Compliant: Yes; ComponentLink1URL: https://datasheet.ciiva.com/11175/fdmc8030-11175489.pdf?src-supplier=Avnet; ComponentLink1Description: https://datasheet.ciiva.com/11175/fdmc8030-11175489.pdf?src-supplier=Avnet; ComponentLink2URL: https://datasheet.ciiva.com/4439/fdmc8030-103806-4439986.pdf?src-supplier=Mouser; ComponentLink2Description: https://datasheet.ciiva.com/4439/fdmc8030-103806-4439986.pdf?src-supplier=Mouser; ComponentLink3URL: https://datasheet.ciiva.com/15044/fdmc8030-15044346.pdf?src-supplier=Digi-Key; ComponentLink3Description: https://datasheet.ciiva.com/15044/fdmc8030-15044346.pdf?src-supplier=Digi-Key; Supplier Part Number 1: 4079668; LCSC Part Number: C890952; Item Type: Mosfet
footprint 8-Power33 (3x3)
part A pins: 1 G1, 2 S1, 10 D1
part B pins: 5 S2, 8 G2, 9 D2

## FDMC8327L
designator Q?
POWER FIELD-EFFECT TRANSISTOR, 1; Manufacturer: ON Semiconductor / Fairchild; Manufacturer Part Number: FDMC8327L; Rds On Max: 9.7mR; Input Capacitance: 1.85nF; Rise Time: 2.2ns; Drain to Source Voltage (Vdss): 40V; Continuous Drain Current (ID): 14A; Max Power Dissipation: 30W; Gate to Source Voltage (Vgs): 20V; Number of Elements: 1; Turn-On Delay Time: 8.4ns; Turn-Off Delay Time: 20ns; Threshold Voltage: 1.7V; Element Configuration: Single; Polarity: N-CHANNEL; Item Type: Mosfet; Supplier 1: RSComponents; RoHS: Yes; Category: Uncategorized; Stock 1: 12000; Pricing 1: 10=1.13200, 100=0.79800, 500=0.71800, 1000=0.59800 (GBP); Mount: Surface Mount; Number of Pins: 8; Weight: 0.18g; Min Operating Temperature: -55°C; Max Operating Temperature: 150°C; Package Quantity: 1; Packaging: Tape and Reel; Drain to Source Breakdown Voltage: 40V; Drain to Source Resistance: 9.7mR; Power Dissipation: 30W; Fall Time: 2.2ns; Series: PowerTrench®; Length: 3.3mm; Width: 3.3mm; Height: 0.75mm; Radiation Hardening: No; Reach SVHC Compliant: Yes; RoHS Compliant: Yes; ComponentLink1URL: https://datasheet.ciiva.com/13060/fdmc8327l-103580-13060051.pdf?src-supplier=Mouser; ComponentLink1Description: https://datasheet.ciiva.com/13060/fdmc8327l-103580-13060051.pdf?src-supplier=Mouser; ComponentLink2URL: https://datasheet.ciiva.com/29752/fdmc8327l-29752225.pdf?src-supplier=Digi-Key; ComponentLink2Description: https://datasheet.ciiva.com/29752/fdmc8327l-29752225.pdf?src-supplier=Digi-Key; ComponentLink3URL: https://datasheet.ciiva.com/7967/1774752-7967973.pdf?src-supplier=Element14; ComponentLink3Description: https://datasheet.ciiva.com/7967/1774752-7967973.pdf?src-supplier=Element14; ComponentLink4URL: https://datasheet.ciiva.com/29752/fdmc8327l-29752230.pdf?src-supplier=Digi-Key; ComponentLink4Description: https://datasheet.ciiva.com/29752/fdmc8327l-29752230.pdf?src-supplier=Digi-Key; ComponentLink5URL: https://datasheet.ciiva.com/11175/fdmc8327l-11175500.pdf?src-supplier=Avnet; ComponentLink5Description: https://datasheet.ciiva.com/11175/fdmc8327l-11175500.pdf?src-supplier=Avnet; ComponentLink6URL: https://datasheet.ciiva.com/29752/fdmc8327l-29752220.pdf?src-supplier=Digi-Key; ComponentLink6Description: https://datasheet.ciiva.com/29752/fdmc8327l-29752220.pdf?src-supplier=Digi-Key; Supplier Part Number 1: 8648203P; LCSC Part Number: *
footprint 8-MLP (3.3x3.3)
pins: 1 S, 2 S, 3 S, 4 G, 5 D, 6 D, 7 D, 8 D

## FDMC8622
designator Q?
MOSFET N-CH 100V 4A/16A 8MLP; Manufacturer: ON Semiconductor / Fairchild; Manufacturer Part Number: FDMC8622; Item Type: MOSFETs; Supplier: Digikey; LCSC Part Number: C463717; RoHS: Yes; Stock: 31990; Pricing: 1=1.72, 10=1.162, 100=0.822, 500=0.67044, 1000=0.62092 (USD); ComponentLink1URL: https://datasheet.ciiva.com/6369/fdmc8622-6369384.pdf?src-supplier=Digikey; ComponentLink1Description: https://datasheet.ciiva.com/6369/fdmc8622-6369384.pdf?src-supplier=Digikey; ComponentLink2URL: https://datasheet.ciiva.com/4438/fdmc8622-78408-4438454.pdf?src-supplier=Mouser; ComponentLink2Description: https://datasheet.ciiva.com/4438/fdmc8622-78408-4438454.pdf?src-supplier=Mouser; ComponentLink3URL: https://datasheet.ciiva.com/25625/0900766b810c963b-25625703.pdf?src-supplier=Rs; ComponentLink3Description: https://datasheet.ciiva.com/25625/0900766b810c963b-25625703.pdf?src-supplier=Rs; ComponentLink4URL: https://datasheet.ciiva.com/23705/1730099-23705419.pdf?src-supplier=Newark; ComponentLink4Description: https://datasheet.ciiva.com/23705/1730099-23705419.pdf?src-supplier=Newark; ComponentLink5URL: https://datasheet.ciiva.com/7967/1783755-7967984.pdf?src-supplier=Element14; ComponentLink5Description: https://datasheet.ciiva.com/7967/1783755-7967984.pdf?src-supplier=Element14; ComponentLink6URL: https://datasheet.ciiva.com/6369/fdmc8622-6369387.pdf?src-supplier=Digikey; ComponentLink6Description: https://datasheet.ciiva.com/6369/fdmc8622-6369387.pdf?src-supplier=Digikey; ComponentLink7URL: https://datasheet.ciiva.com/6369/fdmc8622-6369390.pdf?src-supplier=Digikey; ComponentLink7Description: https://datasheet.ciiva.com/6369/fdmc8622-6369390.pdf?src-supplier=Digikey
footprint 8-MLP (3.3x3.3)
pins: 1 S, 2 S, 3 S, 4 G, 5 D, 6 D, 7 D, 8 D

## FDMQ8205A
designator Q?
GREENBRIDGETM 2 SERIES OF HIGH-E; Manufacturer: ON Semiconductor / Fairchild; Manufacturer Part Number: FDMQ8205A; Item Type: Mosfet; FET Type: N and P-Channel; Operating Supply Current: 400uA; Max Power Dissipation: 780mW; Max Supply Voltage: 57V; Number of Outputs: 2NUMBER; Supplier: Mouser; Supplier Part Number: 512-FDMQ8205A; RoHS: Yes; Stock: 84; Pricing: 1=3.2, 10=2.69, 50=2.69, 100=2.18, 1000=1.66, 10000=1.56 (USD); Mounting Technology: Surface Mount; Weight: 0.21g; Min Operating Temperature: -40°C; Max Operating Temperature: 85°C; Packaging: Cut Tape; Series: GreenBridge™; Output Voltage: 57V; Height: 800um; RoHS Compliant: Yes; ComponentLink1URL: http://www.farnell.com/datasheets/2724479.pdf?src-supplier=Farnell; ComponentLink1Description: http://www.farnell.com/datasheets/2724479.pdf?src-supplier=Farnell; ComponentLink2URL: http://www.onsemi.com/pub/Collateral/FDMQ8205A-D.pdf?src-supplier=Digikey; ComponentLink2Description: http://www.onsemi.com/pub/Collateral/FDMQ8205A-D.pdf?src-supplier=Digikey; ComponentLink3URL: http://www.farnell.com/datasheets/2724479.pdf?src-supplier=Newark; ComponentLink3Description: http://www.farnell.com/datasheets/2724479.pdf?src-supplier=Newark
footprint 12-MLP (5x4.5)
pins: 1 G1, 2 OUTN, 3 OUTN, 4 G2, 5 OUTP, 6 OUTP, 7 OUTP, 8 OUTP, 9 G3, 10 OUTN, 11 OUTN, 12 G4, 13 INPUT1, 14 INPUT1, 15 INPUT2, 16 INPUT2

## FDN306P
designator Q?
MOSFET P-CH 12V 2.6A SUPERSOT3; Manufacturer: ON Semiconductor / Fairchild; Manufacturer Part Number: FDN306P; Rds On Max: 40mR; Input Capacitance: 1.138nF; Max Power Dissipation: 500mW; Gate to Source Voltage (Vgs): 8V; Number of Elements: 1; Turn-Off Delay Time: 38ns; Turn-On Delay Time: 11ns; Element Configuration: Single; Rise Time: 10ns; Threshold Voltage: -600mV; Drain to Source Breakdown Voltage: -12V; Polarity: P-CHANNEL; Current Rating: -2.6A; Current: 26A; Supplier 1: Digi-Key; RoHS: Yes; Category: MOSFETs; Stock 1: 12409; Pricing 1: 1=0.59000, 10=0.50700, 25=0.47360, 100=0.37880, 500=0.29766, 1000=0.23001 (USD); Mount: Surface Mount; Case/Package: TO-236-3; Number of Pins: 3; Contact Plating: Tin,Matte; Min Operating Temperature: -55°C; Max Operating Temperature: 150°C; Packaging: Tape and Reel; Package Quantity: 3000; Drain to Source Voltage (Vdss): 12V; Continuous Drain Current (ID): 2.6A; Drain to Source Resistance: 40mR; Power Dissipation: 500mW; Series: PowerTrench®; Fall Time: 10ns; Nominal Vgs: -600mV; On-State Resistance: 40MR; Drain-source On Resistance-Max: 40MR; Dual Supply Voltage: -12V; Termination: SMD/SMT; Voltage Rating (DC): -12V; Voltage: 12V; Length: 2.92mm; Width: 1.4mm; Height: 0.94mm; Radiation Hardening: No; REACH SVHC: No SVHC; RoHS Compliant: Yes; Lead Free: Lead Free; ComponentLink1URL: https://datasheet.ciiva.com/6383/fdn306p-6383301.pdf?src-supplier=Digi-Key; ComponentLink1Description: https://datasheet.ciiva.com/6383/fdn306p-6383301.pdf?src-supplier=Digi-Key; ComponentLink2URL: https://datasheet.ciiva.com/4439/fdn306p-50876-4439911.pdf?src-supplier=Mouser; ComponentLink2Description: https://datasheet.ciiva.com/4439/fdn306p-50876-4439911.pdf?src-supplier=Mouser; ComponentLink3URL: https://datasheet.ciiva.com/27050/889760-27050636.pdf?src-supplier=Jameco; ComponentLink3Description: https://datasheet.ciiva.com/27050/889760-27050636.pdf?src-supplier=Jameco; ComponentLink4URL: https://datasheet.ciiva.com/14170/fdn306p-eng-tds-14170925.pdf?src-supplier=Distrelec; ComponentLink4Description: https://datasheet.ciiva.com/14170/fdn306p-eng-tds-14170925.pdf?src-supplier=Distrelec; ComponentLink5URL: https://datasheet.ciiva.com/22700/264983-22700885.pdf?src-supplier=Element14; ComponentLink5Description: https://datasheet.ciiva.com/22700/264983-22700885.pdf?src-supplier=Element14; ComponentLink6URL: https://datasheet.ciiva.com/26144/fdn306p-26144214.pdf?src-supplier=Avnet+Europe; ComponentLink6Description: https://datasheet.ciiva.com/26144/fdn306p-26144214.pdf?src-supplier=Avnet+Europe; ComponentLink7URL: https://datasheet.ciiva.com/6383/fdn306p-6383304.pdf?src-supplier=Digi-Key; ComponentLink7Description: https://datasheet.ciiva.com/6383/fdn306p-6383304.pdf?src-supplier=Digi-Key; ComponentLink8URL: https://datasheet.ciiva.com/11175/fdn306p-11175160.pdf?src-supplier=Avnet; ComponentLink8Description: https://datasheet.ciiva.com/11175/fdn306p-11175160.pdf?src-supplier=Avnet; ComponentLink9URL: https://datasheet.ciiva.com/6383/fdn306p-6383306.pdf?src-supplier=Digi-Key; ComponentLink9Description: https://datasheet.ciiva.com/6383/fdn306p-6383306.pdf?src-supplier=Digi-Key; ComponentLink10URL: https://datasheet.ciiva.com/17275/fdn306p-17275114.pdf?src-supplier=Future+Electronics; ComponentLink10Description: https://datasheet.ciiva.com/17275/fdn306p-17275114.pdf?src-supplier=Future+Electronics; ComponentLink11URL: https://datasheet.ciiva.com/22655/fdn306p-22655327.pdf?src-supplier=Element14; ComponentLink11Description: https://datasheet.ciiva.com/22655/fdn306p-22655327.pdf?src-supplier=Element14; Supplier Part Number 1: FDN306PCT-ND; LCSC Part Number: C154510
footprint SOT-23 (TRANS NPN 40V 0.6A SOT23)
pins: 1 G, 2 S, 3 D

## FDN335N
designator Q?
SOT-23 MOSFETs ROHS; Manufacturer: TECH PUBLIC; Manufacturer Part Number: FDN335N; Item Type: Mosfet; Package: SOT-23; LCSC Part Number: C5123904; ComponentLink1Description: LCSC; ComponentLink1URL: https://www.lcsc.com/product-detail/MOSFETs_TECH-PUBLIC-FDN335N_C5123904.html
footprint SOT-23 (TRANS NPN 40V 0.6A SOT23)
pins: 1 G, 2 S, 3 D

## FDN337N
designator Q?
MOSFET N-CH 30V 2.2A SUPERSOT3; Manufacturer: ON Semiconductor / Fairchild; Manufacturer Part Number: FDN337N; Item Type: MOSFETs; Gate to Source Voltage (Vgs): 8V; Input Capacitance: 300pF; Max Power Dissipation: 500mW; Drain to Source Resistance: 65mR; Turn-Off Delay Time: 17ns; Rise Time: 10ns; Turn-On Delay Time: 4ns; Polarity: N-CHANNEL; Nominal Vgs: 700mV; Number of Elements: 1; Element Configuration: Single; Supplier: Future Electronics; LCSC Part Number: C241805; RoHS: Yes; Stock: 1734000; Pricing: 3000=0.0695, 9000=0.0677, 12000=0.0672, 30000=0.0658, 45000=0.0644 (USD); Mounting Technology: Surface Mount; Case/Package: TO-236-3; Pins: 3; Weight: 0.03g; Min Operating Temperature: -55°C; Max Operating Temperature: 150°C; Continuous Drain Current (ID): 2.2A; Packaging: Tape and Reel; Drain to Source Voltage (Vdss): 30V; Drain to Source Breakdown Voltage: 30V; Power Dissipation: 500mW; Rds On Max: 65mR; Fall Time: 10ns; Voltage Rating (DC): 30V; Current Rating: 2.2A; Series: -; Package Quantity: 3000; Dual Supply Voltage: 30V; Termination: SMD/SMT; Threshold Voltage: 700mV; Drain-source On Resistance-Max: 65mR; Length: 2.92mm; Width: 3.05mm; Height: 0.94mm; Reach SVHC Compliant: No; Lead Free: Lead Free; RoHS Compliant: Yes; ComponentLink1URL: https://datasheet.ciiva.com/4442/fdn337n-44286-4442315.pdf?src-supplier=Mouser; ComponentLink1Description: https://datasheet.ciiva.com/4442/fdn337n-44286-4442315.pdf?src-supplier=Mouser; ComponentLink2URL: https://datasheet.ciiva.com/14092/fdn337n-eng-datasheet-14092051.pdf?src-supplier=Distrelec; ComponentLink2Description: https://datasheet.ciiva.com/14092/fdn337n-eng-datasheet-14092051.pdf?src-supplier=Distrelec; ComponentLink3URL: https://datasheet.ciiva.com/19470/871017-19470804.pdf?src-supplier=Jameco; ComponentLink3Description: https://datasheet.ciiva.com/19470/871017-19470804.pdf?src-supplier=Jameco; ComponentLink4URL: https://datasheet.ciiva.com/6037/fdn337n-6037720.pdf?src-supplier=Farnell; ComponentLink4Description: https://datasheet.ciiva.com/6037/fdn337n-6037720.pdf?src-supplier=Farnell; ComponentLink5URL: https://datasheet.ciiva.com/22681/220571-22681884.pdf?src-supplier=Element14; ComponentLink5Description: https://datasheet.ciiva.com/22681/220571-22681884.pdf?src-supplier=Element14; ComponentLink6URL: https://datasheet.ciiva.com/22655/220571-22655333.pdf?src-supplier=Element14; ComponentLink6Description: https://datasheet.ciiva.com/22655/220571-22655333.pdf?src-supplier=Element14; ComponentLink7URL: https://datasheet.ciiva.com/7968/220571-7968126.pdf?src-supplier=Element14; ComponentLink7Description: https://datasheet.ciiva.com/7968/220571-7968126.pdf?src-supplier=Element14; ComponentLink8URL: https://datasheet.ciiva.com/16931/fdn337n-16931214.pdf?src-supplier=Future+Electronics; ComponentLink8Description: https://datasheet.ciiva.com/16931/fdn337n-16931214.pdf?src-supplier=Future+Electronics; ComponentLink9URL: https://datasheet.ciiva.com/8115/fdn337n-8115063.pdf?src-supplier=Avnet; ComponentLink9Description: https://datasheet.ciiva.com/8115/fdn337n-8115063.pdf?src-supplier=Avnet; ComponentLink10URL: https://datasheet.ciiva.com/931/fdn337n-931875.pdf?src-supplier=Digikey; ComponentLink10Description: https://datasheet.ciiva.com/931/fdn337n-931875.pdf?src-supplier=Digikey; ComponentLink11URL: https://datasheet.ciiva.com/8115/fdn337n-8115069.pdf?src-supplier=Avnet; ComponentLink11Description: https://datasheet.ciiva.com/8115/fdn337n-8115069.pdf?src-supplier=Avnet; ComponentLink12URL: https://datasheet.ciiva.com/931/fdn337n-931876.pdf?src-supplier=Digikey; ComponentLink12Description: https://datasheet.ciiva.com/931/fdn337n-931876.pdf?src-supplier=Digikey; ComponentLink13URL: https://datasheet.ciiva.com/931/fdn337n-931877.pdf?src-supplier=Digikey; ComponentLink13Description: https://datasheet.ciiva.com/931/fdn337n-931877.pdf?src-supplier=Digikey
footprint SOT-23 (TRANS NPN 40V 0.6A SOT23)
pins: 1 G, 2 S, 3 D

## FDN338P
designator Q?
SOT-23 MOSFETs ROHS; Manufacturer: TECH PUBLIC; Manufacturer Part Number: FDN338P; Item Type: Mosfet; ComponentLink1Description: LCSC; ComponentLink1URL: https://www.lcsc.com/product-detail/MOSFETs_TECH-PUBLIC-FDN338P_C2890130.html; Package: SOT-23; LCSC Part Number: C2890130
footprint SOT-23 (TRANS NPN 40V 0.6A SOT23)
pins: 1 G, 2 S, 3 D

## FDS4435A
designator Q?
SOIC-8 MOSFETs ROHS; Manufacturer: TECH PUBLIC; Manufacturer Part Number: FDS4435A; Item Type: Mosfet; Package: SOIC-8; LCSC Part Number: C5122021; ComponentLink1Description: LCSC; ComponentLink1URL: https://www.lcsc.com/product-detail/MOSFETs_TECH-PUBLIC-FDS4435A_C5122021.html
footprint SOIC-8
pins: 1 S, 2 S, 3 S, 4 G, 5 D, 6 D, 7 D, 8 D

## FQB27P06TM
designator Q?
MOSFET P-CH 60V 27A D2PAK; Manufacturer: ON Semiconductor / Fairchild; Manufacturer Part Number: FQB27P06TM; Item Type: MOSFETs; Supplier: Digikey; Supplier Part Number: FQB27P06TMCT-ND; RoHS: Yes; Stock: 2039; Pricing: 1=1.97, 10=1.634, 100=1.3003 (USD); ComponentLink1URL: https://datasheet.ciiva.com/6037/1781179-6037411.pdf?src-supplier=Farnell; ComponentLink1Description: https://datasheet.ciiva.com/6037/1781179-6037411.pdf?src-supplier=Farnell; ComponentLink2URL: https://datasheet.ciiva.com/15137/getdatasheetpartid-95969-15137803.pdf?src-supplier=Verical; ComponentLink2Description: https://datasheet.ciiva.com/15137/getdatasheetpartid-95969-15137803.pdf?src-supplier=Verical; ComponentLink3URL: https://datasheet.ciiva.com/4441/fqb27p06-109865-4441954.pdf?src-supplier=Mouser; ComponentLink3Description: https://datasheet.ciiva.com/4441/fqb27p06-109865-4441954.pdf?src-supplier=Mouser; ComponentLink4URL: https://datasheet.ciiva.com/1256/1729188-1256195.pdf?src-supplier=Newark; ComponentLink4Description: https://datasheet.ciiva.com/1256/1729188-1256195.pdf?src-supplier=Newark; ComponentLink5URL: https://datasheet.ciiva.com/6382/fqb27p06-6382008.pdf?src-supplier=Digikey; ComponentLink5Description: https://datasheet.ciiva.com/6382/fqb27p06-6382008.pdf?src-supplier=Digikey; ComponentLink6URL: https://datasheet.ciiva.com/6382/fqb27p06-6382011.pdf?src-supplier=Digikey; ComponentLink6Description: https://datasheet.ciiva.com/6382/fqb27p06-6382011.pdf?src-supplier=Digikey; ComponentLink7URL: https://datasheet.ciiva.com/22671/1781179-22671975.pdf?src-supplier=Element14; ComponentLink7Description: https://datasheet.ciiva.com/22671/1781179-22671975.pdf?src-supplier=Element14
footprint D2Pak.
pins: 1 G, 2 S, 3 D